# Altium footprint library Connectors.PcbLib: 305 footprints (part 11 of 20)
Each footprint in its own frame and in the unit in brackets; x right, y up, seen from the top. Pads: shape width x height; smd on the part's side, far side on the other; paste and mask are expansions set on the pad; w line width, h text height; cw(c..) or ccw(c..) is an arc to the next point about the centre after c.
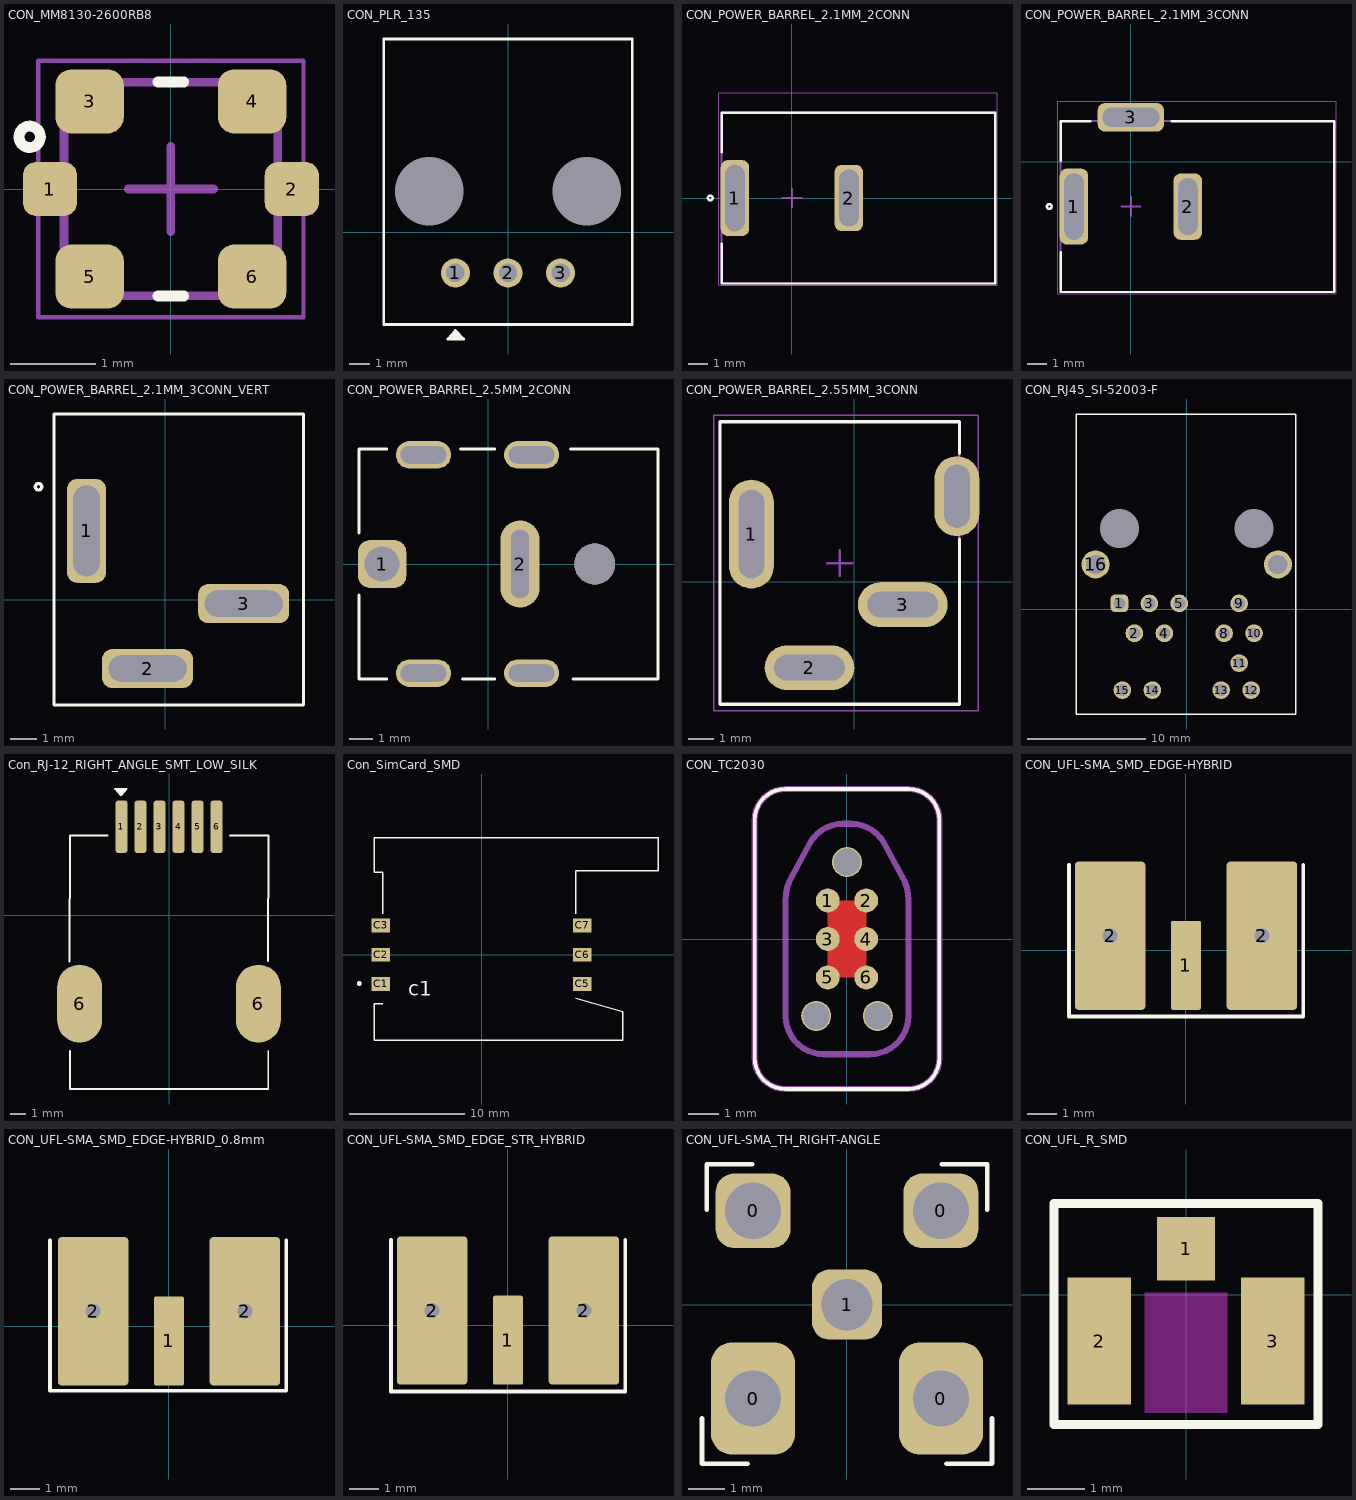
[diagram p10: the footprints below, top view; thin cyan lines are the x and y axes]

## CON_MM8130-2600RB8 [mm] "/ 20190222 / C-A.Serna.A"
pads (6):
  rrect50% 0.635x0.635 smd: 1(-1.414,0) 2(1.414,0)
  rrect50% 0.8x0.75 smd: 3(-0.95,1.025) 4(0.95,1.025) 5(-0.95,-1.025) 6(0.95,-1.025)
Top Overlay:
  circle w0.127: c-1.651,0.61 r0.125
  lines w0.127: -0.15,-1.25 0.15,-1.25 ; -0.15,1.25 0.15,1.25
Mechanical 1:
  lines w0.1: -1.25,-1.25 -1.25,1.25 1.25,1.25 1.25,-1.25 -1.25,-1.25
Mechanical 15:
  lines w0.05: -1.55,-1.5 1.55,-1.5 1.55,1.5 -1.55,1.5 -1.55,-1.5
  lines w0.1: -0.5,0 0.5,0 ; 0,-0.5 0,0.5
3D body "MS-156C3.stp": height 1.36, standoff 0.01, extent -1.16,-1.15 1.14,1.15

## CON_PLR_135 [mm] "/20200728/M-C.Calderon"
pads (5):
  round 1.4 hole 0.889: 1(-2.54,-1.975) 2(0,-1.975) 3(2.54,-1.975)
  round 3.2 hole 3.302 unplated: ""(-3.81,1.975) ""(3.81,1.975)
Top Overlay:
  region: -2.907,-5.166 -2.145,-5.166 -2.54,-4.752
  lines w0.127: -5.994,-4.464 5.994,-4.464 5.994,9.328 0,9.328 -5.994,9.328 -5.994,-4.464 ; -2.907,-5.166 -2.54,-4.752 -2.145,-5.166 -2.907,-5.166
3D body "PLR135-T1.STEP": height 11.52, standoff -4.08, extent -5.75,-4.266 5.75,9.334

## CON_POWER_BARREL_2.1MM_2CONN [mm] "/ 20191002 / C-D Viveros"
pads (2):
  rrect50% 1.5x4 hole 1.016 slot 3.5 at 90 deg: 1(-3,0)
  rrect50% 1.5x3.5 hole 1.016 slot 3 at 90 deg: 2(3,0)
Top Overlay:
  circle w0.127: c-4.3,0 r0.125
  lines w0.127: -3.7,-2.4 -3.7,-4.5 10.7,-4.5 10.7,4.5 -3.7,4.5 -3.7,2.4
Mechanical 1:
  lines w0.1: -3.7,-4.5 10.7,-4.5 10.7,4.5 -3.7,4.5 -3.7,-4.5
Mechanical 15:
  lines w0.05: -3.85,-4.6 10.8,-4.6 10.8,5.55 -3.85,5.55 -3.85,-4.6
  lines w0.1: -0.5,0 0.5,0 ; 0,-0.5 0,0.5
3D body "CUI_PJ-037AH.step": height 11.01, standoff -3.49, extent -3.95,-4.5 10.55,4.5

## CON_POWER_BARREL_2.1MM_3CONN [mm] "/ 20190222 / C-A.Serna.A"
pads (3):
  rrect50% 1.5x4 hole 1.016 slot 3.5 at 90 deg: 1(-3,-2.35)
  rrect50% 1.5x3.5 hole 1.016 slot 3 at 90 deg: 2(3,-2.35)
  rrect50% 3.5x1.5 hole 1.016 slot 3 at 0 deg: 3(0,2.35)
Top Overlay:
  circle w0.127: c-4.3,-2.35 r0.125
  lines w0.127: -3.7,-4.75 -3.7,-6.85 10.7,-6.85 10.7,2.15 2.15,2.15 ; -3.7,0.05 -3.7,2.15 -2.15,2.15
Mechanical 1:
  lines w0.1: -3.7,-6.85 10.7,-6.85 10.7,2.15 -3.7,2.15 -3.7,-6.85
Mechanical 15:
  lines w0.05: -3.85,-6.95 10.8,-6.95 10.8,3.2 -3.85,3.2 -3.85,-6.95
  lines w0.1: -0.5,-2.35 0.5,-2.35 ; 0,-2.85 0,-1.85
3D body "pj-002a.stp": height 11, standoff -3.5, extent -3.7,-6.85 10.7,2.55

## CON_POWER_BARREL_2.1MM_3CONN_VERT [mm] "/20220804/J-E.Pachon"
pads (3):
  rrect50% 1.5x4 hole 1.016 slot 3.5 at 90 deg: 1(-3.025,2.65)
  rrect50% 3.5x1.5 hole 1.016 slot 3 at 0 deg: 2(-0.675,-2.65) 3(3.025,-0.15)
Top Overlay:
  circle w0.127: c-4.875,4.35 r0.125
  lines w0.127: -4.275,-4.05 -4.275,7.15 5.325,7.15 5.325,-4.05 -4.275,-4.05
3D body "694106402002 (rev1).stp": height 13.31, standoff -4.29, extent -3.975,-3.8 5.025,6.9

## CON_POWER_BARREL_2.5MM_2CONN [mm] "/ 20200522/ J-P.Vargas.A"
pads (7):
  rrect50% 2.1x2.1 hole 1.524: 1(-4.625,0)
  oval 1.7x3.8 hole 0.762 slot 3 at 90 deg: 2(1.375,0)
  oval 2.4x1.2 hole 0.762 slot 2 at 0 deg: ""(-2.825,-4.75) ""(-2.825,4.75) ""(1.875,-4.75) ""(1.875,4.75)
  round 1.778 hole 1.778 unplated: ""(4.625,0)
Top Overlay:
  lines w0.127: -5.625,-1.35 -5.625,-5 -4.425,-5 ; -5.625,1.35 -5.625,5 -4.425,5 ; -1.225,5 0.275,5 ; -1.125,-5 0.275,-5 ; 3.575,5 7.375,5 7.375,-5 3.675,-5
3D body "JACK-C-PC-10A-RA(R).stp": height 10.01, standoff -2.19, extent -5.604,-5.002 7.396,5.002

## CON_POWER_BARREL_2.55MM_3CONN [mil] "/ 20190617/ J-P.Vargas.A"
pads (4):
  oval 70x170 hole 40 slot 137.8 at 90 deg: 1(-160.43,74.8)
  oval 140x70 hole 40 slot 110.24 at 0 deg: 2(-69.88,-133.86) 3(75.79,-35.43)
  oval 70x125 hole 40 slot 98.43 at 90 deg: ""(160.43,133.86)
Top Overlay:
  lines w5: 164.37,66.93 164.37,-190.94 -209.65,-190.94 -209.65,250 164.37,250 164.37,200.79
Mechanical 1:
  lines w3.94: -209.65,-190.94 164.37,-190.94 164.37,250 -209.65,250 -209.65,-190.94
Mechanical 15:
  lines w1.97: -219.49,-200.79 193.9,-200.79 193.9,259.84 -219.49,259.84 -219.49,-200.79
  lines w3.94: -42.32,29.53 -2.95,29.53 ; -22.64,9.84 -22.64,49.21
3D body "dcj250-15-a-k1-c_reva.step": height 572.83, standoff -57.18, extent -209.65,-190.94 164.37,250

## CON_RJ45_SI-52003-F [mm] "/ 20190222 / C-A.Serna.A"
pads (17):
  rrect50% 1.5x1.5 hole 1.016: 1(-5.715,0.51)
  round 1.5 hole 1.016: 2(-4.445,-2.03) 3(-3.175,0.51) 4(-1.905,-2.03) 5(-0.635,0.51) 8(3.175,-2.03) 9(4.445,0.51) 10(5.715,-2.03) 11(4.445,-4.57) 12(5.465,-6.86) 13(2.922,-6.86) 14(-2.925,-6.86) 15(-5.465,-6.86)
  round 2.4 hole 1.651: 16(-7.745,3.81) ""(7.745,3.81)
  round 3.25 hole 3.302: ""(-5.715,6.86) ""(5.715,6.86)
Top Overlay:
  lines w0.127: -9.373,-8.888 9.246,-8.888 9.246,16.588 -9.373,16.588 -9.373,-8.888
3D body: height 15.21, standoff 0, extent -9.195,-8.837 8.785,16.563

## Con_RJ-12_RIGHT_ANGLE_SMT_LOW_SILK [mm] "/ 20190222 / C-A.Serna.A"
pads (8):
  rrect50% 0.8x3.5 smd: 1(-3.175,5.898) 2(-1.905,5.898) 3(-0.635,5.898) 4(0.635,5.898) 5(1.905,5.898) 6(3.175,5.898)
  oval 3x5.21 smd: 6(-5.965,-5.897) 6(5.965,-5.897)
Top Overlay:
  region: -2.836,8.417 -3.598,8.417 -3.203,8.003
  lines w0.127: -6.629,-3.081 -6.609,5.301 ; -6.609,5.313 -4.09,5.313 ; -6.59,-9.052 -6.59,-11.592 6.618,-11.592 6.618,-9.052 ; 4.053,5.313 6.634,5.313 6.613,-3.069 ; -3.598,8.417 -3.203,8.003 -2.836,8.417 -3.598,8.417
3D body "441440005.stp": height 11.75, standoff 0.01, extent -6.579,-11.603 6.629,6.786

## Con_SimCard_SMD [mm] "/20220113/J-E.Pachon"
pads (6):
  rect 1.6x1.2 smd: C1(-8.75,-2.54) C2(-8.75,0) C3(-8.75,2.54) C5(8.75,-2.54) C6(8.75,0) C7(8.75,2.54)
Top Overlay:
  circle w0.2: c-10.6,-2.49 r0.112
  lines w0.127: -8.55,-4.24 -9.3,-4.24 -9.3,-7.44 12.25,-7.44 12.25,-4.94 8.15,-3.79 ; -8.55,3.56 -8.55,7.16 -9.3,7.16 -9.3,10.16 15.3,10.16 15.3,7.26 8.15,7.26 8.15,3.56
  text "c1" at -6.35,-3.55 h1.27
3D body "693012040811.stp": height 1.81, standoff -0.08, extent -9.337,-7.448 15.263,10.27

## CON_TC2030 [mil] "/ 20191204/C-A.Serna.A"
pads (9):
  round 31 smd paste-196.85: 1(-25,50) 2(25,50) 3(-25,0) 4(25,0) 5(-25,-50) 6(25,-50)
  round 39 hole 35 unplated: ""(-40,-100) ""(0,100) ""(40,-100)
Top Layer:
  pour cut-out: 25,50 -25,50 -25,-50 25,-50
Top Overlay:
  lines w5: -120,-155 ccw(c-80,-155) -80,-195 80,-195 ccw(c80,-155) 120,-155 120,155 ccw(c80,155) 80,195 -80,195 ccw(c-80,155) -120,155 -120,-155
Mechanical 15:
  lines w7.87: -79.92,-99.96 -80,51 cw(c-21.41,51) -72.15,80.29 -48.17,124.92 cw(c-5,100) -5,149.84 5,149.84 cw(c5,100) 48.17,124.92 72.15,80.29 cw(c21.41,51) 80,51 79.92,-100 ; -79.8,-99.96 ccw(c-29.96,-99.96) -30,-149.8 30,-149.8 ccw(c30,-99.96) 79.84,-100 ; -120,-155 ccw(c-80,-155) -80,-195 80,-195 ccw(c80,-155) 120,-155 120,155 ccw(c80,155) 80,195 -80,195 ccw(c-80,155) -120,155 -120,-155

## CON_UFL-SMA_SMD_EDGE-HYBRID [mil] "/ 20190222 / C-A.Serna.A"
height 43.31
pads (3):
  rrect10% 40x120 smd: 1(0,-20)
  rrect10% 95x200 hole 20: 2(-102.36,20) 2(102.36,20)
Top Overlay:
  lines w5: -157.87,115.59 -157.87,-88.98 158.24,-88.98 158.24,115.59
3D body "User Library-edgemtsma-062.step": height 140, standoff -110, extent -125.02,-79.52 124.98,517.48
3D body "U.FL-R-SMT-1.stp": height 49.38, standoff 0.17, extent -58.89,19.36 59.21,141.4

## CON_UFL-SMA_SMD_EDGE-HYBRID_0.8mm [mil] "/ 20190222 / C-A.Serna.A"
height 43.31
pads (3):
  rrect10% 40x120 smd: 1(0,-20)
  rrect10% 95x200 hole 20: 2(-102.36,20) 2(102.36,20)
Top Overlay:
  lines w5: -160.63,115.59 -160.63,-87.29 158.24,-87.29 158.24,115.59
3D body "U.FL-R-SMT-1.stp": height 49.38, standoff 0.17, extent -60.11,-3.02 58,119.02
3D body "EMPCB-SMAFSTJ-C-HT.STEP": height 155.64, standoff -124.77, extent -139.43,1.4 141.03,528.96

## CON_UFL-SMA_SMD_EDGE_STR_HYBRID [mil] "/ 20200605 / C-D Viveros"
height 78.74
pads (3):
  rrect10% 40x120 smd: 1(0,-20)
  rrect10% 95x200 hole 20: 2(-102.36,20) 2(102.36,20)
Top Overlay:
  lines w5: -157.87,115.28 -157.87,-89.29 158.24,-89.29 158.24,115.28
3D body "User Library-SMA-EDGE-S.step": height 143.21, standoff -106.79, extent -125,-14.49 125,510.31
3D body "U.FL-R-SMT-1.stp": height 49.38, standoff 0.17, extent -58.89,-6.22 59.22,115.83

## CON_UFL-SMA_TH_RIGHT-ANGLE [mil] "/ 20190222 / C-A.Serna.A"
pads (5):
  rrect50% 90x120 hole 60: 0(-100.39,-100.39) 0(100.39,-100.39)
  rrect50% 80x80 hole 60: 0(-100.39,100.39) 0(100.39,100.39)
  rrect50% 75x75 hole 55: 1(0,0)
Top Overlay:
  lines w5: -155,-121.39 -155,-170 -106.39,-170 ; -150,101.39 -150,150 -101.39,150 ; 101.39,150 150,150 150,101.39 ; 106.39,-170 155,-170 155,-121.39
3D body "Antenna_connector_CONSMA002_50Ohm_12.4GHz.step": height 394.2, standoff -153.04, extent -137.79,-137.79 137.8,458.75
3D body "U.FL-R-SMT-1.stp": height 49.38, standoff 0.17, extent -59.05,-137.79 59.06,-15.74

## CON_UFL_R_SMD [mm] "/ 20200812 / M-C.Calderon"
pads (3):
  rect 1x1.1 smd: 1(0,0.8)
  rect 1.1x2.2 smd: 2(-1.5,-0.8) 3(1.5,-0.8)
Top Layer keep-out:
  region: 0.711,-2.045 -0.711,-2.045 -0.711,0.038 0.711,0.038
Top Overlay:
  lines w0.152: -2.286,-2.248 2.286,-2.248 2.286,1.587 -2.286,1.587 -2.286,-2.248
3D body "U.FL-R-SMT-1.stp": height 1.25, standoff 0, extent -1.5,-2.3 1.5,0.8